# Altium integrated library EEEHD1C100AR.IntLib: 1 symbol
Pins are listed as number, name and electrical type; pins without a type are passive.

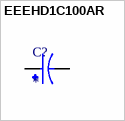
[diagram p0: symbol EEEHD1C100AR]

## EEEHD1C100AR
designator C?
10ÂµF 16V Aluminum Electrolytic Capacitors Radial, Can - SMD 5000 Hrs @ 105Â°C; MP: EEEHD1C100AR; MF: Panasonic; SnapEDA_Link: https://www.snapeda.com/parts/EEEHD1C100AR/Panasonic/view-part/?ref=snap; Package: RADIAL-2 Panasonic; Availability: In Stock; Price: None; Purchase-URL: https://pricing.snapeda.com/search/part/EEEHD1C100AR/?ref=eda; Check_prices: https://www.snapeda.com/parts/EEEHD1C100AR/Panasonic/view-part/?ref=eda; Value: *
footprint CAP_EEEHD1C100AR
pins: 1, 2